# Altium footprint library Vibration_Datalogger.PcbLib: 76 footprints (part 4 of 5)
Each footprint in its own frame and in the unit in brackets; x right, y up, seen from the top. Pads: shape width x height; smd on the part's side, far side on the other; paste and mask are expansions set on the pad; w line width, h text height; cw(c..) or ccw(c..) is an arc to the next point about the centre after c.
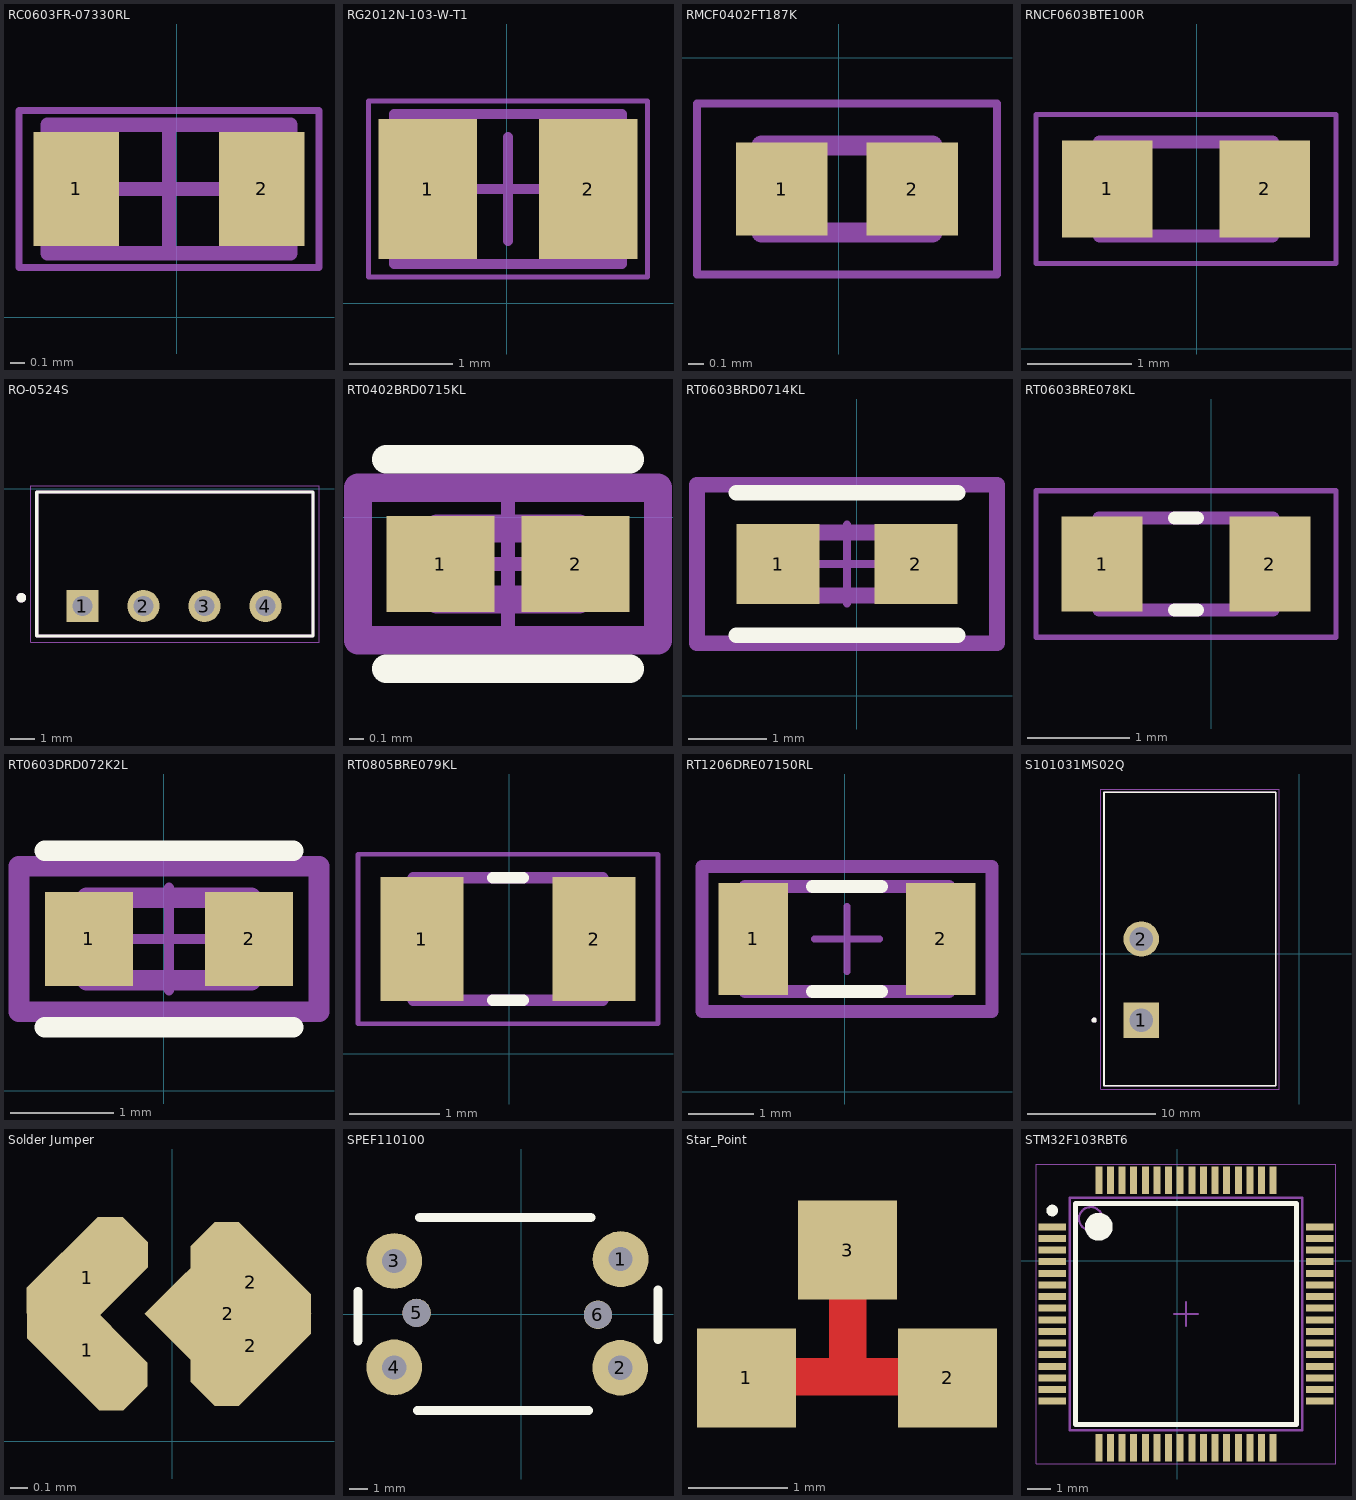
[diagram p3: the footprints below, top view; thin cyan lines are the x and y axes]

## RC0603FR-07330RL [mm] "RES 330 OHM 1% 1/10W 0603"
pads (2):
  rect 0.6x0.8 smd: 1(-0.705,0.897) 2(0.595,0.897)
Mechanical 13:
  lines w0.1: -0.905,0.447 -0.905,1.347 0.795,1.347 0.795,0.447 -0.905,0.447
Mechanical 15:
  lines w0.05: -1.105,0.347 -1.105,1.447 0.995,1.447 0.995,0.347 -1.105,0.347
  lines w0.1: -0.505,0.897 0.395,0.897 ; -0.055,0.447 -0.055,1.347
3D body: height 0.55, standoff 0, extent -0.655,0.447 0.545,1.347
3D body: height 0.55, standoff 0, extent -0.905,0.447 -0.655,1.347
3D body: height 0.55, standoff 0, extent 0.545,0.447 0.795,1.347

## RG2012N-103-W-T1 [mm] "RES SMD 10K OHM 0.05% 1/8W 0805"
pads (2):
  rect 0.95x1.35 smd: 1(-0.761,1.106) 2(0.789,1.106)
Mechanical 13:
  lines w0.1: -1.086,0.381 -1.086,1.831 1.114,1.831 1.114,0.381 -1.086,0.381
Mechanical 15:
  lines w0.05: -1.336,0.256 -1.336,1.956 1.364,1.956 1.364,0.256 -1.336,0.256
  lines w0.1: -0.486,1.106 0.514,1.106 ; 0.014,0.606 0.014,1.606
3D body: height 0.5, standoff 0, extent -0.686,0.381 0.714,1.831
3D body: height 0.5, standoff 0, extent -1.086,0.381 -0.686,1.831
3D body: height 0.5, standoff 0, extent 0.714,0.381 1.114,1.831

## RMCF0402FT187K [mm] "RES 187K OHM 1% 1/16W 0402"
pads (2):
  rect 0.59x0.6 smd paste+0 mask+0.102: 1(-0.368,-0.845) 2(0.472,-0.845)
Mechanical 13:
  lines w0.127: -0.498,-1.125 -0.498,-0.565 0.602,-0.565 0.602,-1.125 -0.498,-1.125
Mechanical 15:
  lines w0.05: -0.913,-1.395 -0.913,-0.295 1.017,-0.295 1.017,-1.395 -0.913,-1.395
3D body "step_temp.STEP": height 0.4, standoff 0, extent -0.448,-1.095 0.552,-0.595

## RNCF0603BTE100R [mm] "100 Ohms ±0.1% 0.167W, 1/6W Chip"
pads (2):
  rect 0.87x0.93 smd paste+0 mask+0.102: 1(-0.857,1.536) 2(0.653,1.536)
Mechanical 13:
  lines w0.127: -0.932,1.086 0.728,1.086 0.728,1.986 -0.932,1.986 -0.932,1.086
Mechanical 15:
  lines w0.05: -1.542,0.821 1.338,0.821 1.338,2.251 -1.542,2.251 -1.542,0.821
3D body "step_temp.STEP": height 0.55, standoff 0, extent -0.877,1.136 0.673,1.936

## RO-0524S [mm] "Recom 1W Iso DC-DC Converter"
pads (4):
  rect 1.338x1.338 hole 0.83: 1(4.141,-4.885)
  round 1.338 hole 0.83: 2(6.681,-4.885) 3(9.221,-4.885) 4(11.761,-4.885)
Top Overlay:
  circle w0.2: c1.601,-4.54 r0.1
  lines w0.127: 2.241,-6.135 13.741,-6.135 13.741,-0.135 2.241,-0.135 2.241,-6.135
Mechanical 13:
  circle w0.2: c1.601,-4.54 r0.1
  lines w0.127: 2.241,-6.135 13.741,-6.135 13.741,-0.135 2.241,-0.135 2.241,-6.135
Mechanical 15:
  lines w0.05: 1.991,-6.385 13.991,-6.385 13.991,0.115 1.991,0.115 1.991,-6.385
3D body "RO-0524S--3DModel-STEP-1.STEP": height 10.72, standoff -3.38, extent 2.241,-6.262 13.741,-0.262

## RT0402BRD0715KL [mm] "RES SMD 15K OHM 0.1% 1/16W 0402"
pads (2):
  rect 0.76x0.672 smd paste+0 mask+0: 1(-2.871,-0.329) 2(-1.919,-0.329)
Top Overlay:
  lines w0.2: -3.251,-1.065 -1.539,-1.065 ; -3.251,0.407 -1.539,0.407
Mechanical 5:
  lines w0.2: -3.451,-0.865 -1.339,-0.865 -1.339,0.207 -3.451,0.207 -3.451,-0.865
  text ".Designator" at -4.427,0.875 h1
Mechanical 13:
  lines w0.2: -2.895,-0.579 -1.895,-0.579 -1.895,-0.079 -2.895,-0.079 -2.895,-0.579
Mechanical 15:
  lines w0.2: -3.451,-0.865 -1.339,-0.865 -1.339,0.207 -3.451,0.207 -3.451,-0.865
Mechanical 16:
  lines w0.1: -2.895,-0.329 -1.895,-0.329 ; -2.395,-0.829 -2.395,0.171
3D body "Res_Yageo_RT0402BRE07118KL_eec.STEP": height 0.25, standoff 0, extent -3.451,-0.865 -1.339,0.207

## RT0603BRD0714KL [mm] "RES SMD 14K OHM 0.1% 1/10W 0603"
pads (2):
  rect 1.059x1.012 smd paste+0 mask+0: 1(-1.003,1.676) 2(0.751,1.676)
Top Overlay:
  lines w0.2: -1.532,0.77 1.28,0.77 ; -1.532,2.582 1.28,2.582
Mechanical 5:
  lines w0.2: -2.032,0.67 -2.032,2.682 1.78,2.682 1.78,0.67 -2.032,0.67
  text ".Designator" at -2.412,3.007 h1
Mechanical 13:
  lines w0.2: -0.926,1.276 -0.926,2.076 0.674,2.076 0.674,1.276 -0.926,1.276
Mechanical 15:
  lines w0.2: -2.032,0.67 -2.032,2.682 1.78,2.682 1.78,0.67 -2.032,0.67
Mechanical 16:
  lines w0.1: -0.626,1.676 0.374,1.676 ; -0.126,1.176 -0.126,2.176
3D body "Res_Yageo_RT0603CRE0724K3L_eec.STEP": height 0.25, standoff 0, extent -2.032,0.67 1.78,2.682

## RT0603BRE078KL [mm] "RES SMD 8K OHM 0.1% 1/10W 0603"
pads (2):
  rect 0.79x0.93 smd: 1(-1.066,2.706) 2(0.574,2.706)
Top Overlay:
  lines w0.127: -0.356,2.256 -0.136,2.256 ; -0.356,3.156 -0.136,3.156
Mechanical 13:
  lines w0.127: -1.096,2.256 -1.096,3.156 0.604,3.156 0.604,2.256 -1.096,2.256
Mechanical 15:
  lines w0.05: -1.711,1.991 -1.711,3.421 1.219,3.421 1.219,1.991 -1.711,1.991
3D body "step_temp.STEP": height 0.55, standoff 0, extent -1.046,2.306 0.554,3.106

## RT0603DRD072K2L [mm] "RES SMD 2.2K OHM 0.5% 1/10W 0603"
pads (2):
  rect 0.859x0.912 smd paste+0 mask+0: 1(-0.724,1.473) 2(0.83,1.473)
Top Overlay:
  lines w0.2: -1.153,0.617 1.259,0.617 ; -1.153,2.329 1.259,2.329
Mechanical 5:
  lines w0.2: -1.403,0.767 1.509,0.767 1.509,2.179 -1.403,2.179 -1.403,0.767
  text ".Designator" at -2.106,2.804 h1
Mechanical 13:
  lines w0.2: -0.747,1.073 0.853,1.073 0.853,1.873 -0.747,1.873 -0.747,1.073
Mechanical 15:
  lines w0.2: -1.403,0.767 1.509,0.767 1.509,2.179 -1.403,2.179 -1.403,0.767
Mechanical 16:
  lines w0.1: -0.447,1.473 0.553,1.473 ; 0.053,0.973 0.053,1.973
3D body "Res_Yageo_RT0603CRE0724K3L_eec.STEP": height 0.25, standoff 0, extent -1.403,0.767 1.509,2.179

## RT0805BRE079KL [mm] "RES SMD 9K OHM 0.1% 1/8W 0805"
pads (2):
  rect 0.92x1.38 smd paste+0 mask+0.102: 1(-0.971,1.272) 2(0.939,1.272)
Top Overlay:
  lines w0.127: -0.186,0.592 0.154,0.592 ; -0.186,1.952 0.154,1.952
Mechanical 13:
  lines w0.127: -1.066,0.592 -1.066,1.952 1.034,1.952 1.034,0.592 -1.066,0.592
Mechanical 15:
  lines w0.05: -1.681,0.332 -1.681,2.212 1.649,2.212 1.649,0.332 -1.681,0.332
3D body "step_temp.STEP": height 0.6, standoff 0, extent -1.016,0.647 0.984,1.897

## RT1206DRE07150RL [mm] "RES SMD 150 OHM 0.5% 1/4W 1206"
pads (2):
  rect 1.058x1.712 smd paste+0 mask+0: 1(-1.395,2.323) 2(1.459,2.323)
Top Overlay:
  lines w0.2: -0.491,1.523 0.555,1.523 ; -0.491,3.123 0.555,3.123
Mechanical 5:
  lines w0.2: -2.174,1.217 2.238,1.217 2.238,3.429 -2.174,3.429 -2.174,1.217
  text ".Designator" at -2.32,3.948 h1
Mechanical 13:
  lines w0.2: -1.518,1.523 1.582,1.523 1.582,3.123 -1.518,3.123 -1.518,1.523
Mechanical 15:
  lines w0.2: -2.174,1.217 2.238,1.217 2.238,3.429 -2.174,3.429 -2.174,1.217
Mechanical 16:
  lines w0.1: -0.468,2.323 0.532,2.323 ; 0.032,1.823 0.032,2.823
3D body "Res_Yageo_RT1206WRB073K92L_eec.STEP": height 0.25, standoff 0, extent -2.174,1.217 2.238,3.429

## S101031MS02Q [mm] "Commutateurs à glissière SPST 6A PC TH AG"
pads (2):
  rect 2.775x2.775 / inner round 2.775 / far side rect 2.775x2.775 hole 1.85: 1(-12.387,-5.18)
  round 2.775 hole 1.85: 2(-12.387,1.17)
Top Overlay:
  circle w0.2: c-16.077,-5.18 r0.1
  lines w0.127: -15.307,-10.325 -1.847,-10.325 -1.847,12.665 -15.307,12.665 -15.307,-10.325
Mechanical 13:
  circle w0.2: c-16.077,-5.18 r0.1
  lines w0.127: -15.307,-10.325 -1.847,-10.325 -1.847,12.665 -15.307,12.665 -15.307,-10.325
Mechanical 15:
  lines w0.05: -15.557,-10.575 -15.557,12.915 -1.597,12.915 -1.597,-10.575 -15.557,-10.575
3D body "step_temp.STEP": height 18.41, standoff -3.56, extent -15.308,-10.323 -1.846,12.664

## Solder Jumper [mil]
pads (5):
  oct 15x30 smd rot 45: 1(-18.76,19.98) 2(17.24,34.98)
  oct 15.75x30 smd rot 135: 1(-18.76,35.98)
  rect 26x26 smd rot 45: 2(12.24,27.98)
  oct 15x30 smd rot 135: 2(17.24,20.98)

## SPEF110100 [mm] "1.5mm-travel Vertical Type SPEF Series"
pads (6):
  round 3 hole 1.3: 1(5.34,2.97) 2(5.32,-2.87) 3(-6.83,2.87) 4(-6.83,-2.85)
  round 1.524 hole 1.5: 5(-5.63,0.08) 6(4.12,-0.02)
Top Overlay:
  lines w0.5: -8.78,-1.42 -8.78,1.23 ; -5.58,-5.17 3.61,-5.17 ; -5.46,5.21 3.73,5.21 ; 7.35,-1.34 7.35,1.31
3D body "SPEF110100.STEP": height 15.65, standoff -2.45, extent -7.024,-4.45 5.524,4.55

## Star_Point [mm]
pads (3):
  rect 1x1 smd: 1(-20.783,151.16)
  rect 1x1 smd mask+0.102: 2(-18.751,151.16) 3(-19.761,152.45)
Top Layer:
  region: -19.569,151.07 -19.569,152.467 -19.95,152.467 -19.95,151.07
  rectangle: -20.51,150.979 -19.113,151.36

## STM32F103RBT6 [mm] "IC MCU 32BIT 128KB FLASH 64LQFP"
pads (64):
  rect 1.2x0.3 smd: 1(-5.369,1.464) 2(-5.369,0.964) 3(-5.369,0.464) 4(-5.369,-0.036) 5(-5.369,-0.536) 6(-5.369,-1.036) 7(-5.369,-1.536) 8(-5.369,-2.036) 9(-5.369,-2.536) 10(-5.369,-3.036) 11(-5.369,-3.536) 12(-5.369,-4.036) 13(-5.369,-4.536) 14(-5.369,-5.036) 15(-5.369,-5.536) 16(-5.369,-6.036) 33(6.131,-6.036) 34(6.131,-5.536) 35(6.131,-5.036) 36(6.131,-4.536) 37(6.131,-4.036) 38(6.131,-3.536) 39(6.131,-3.036) 40(6.131,-2.536) 41(6.131,-2.036) 42(6.131,-1.536) 43(6.131,-1.036) 44(6.131,-0.536) 45(6.131,-0.036) 46(6.131,0.464) 47(6.131,0.964) 48(6.131,1.464)
  rect 0.3x1.2 smd: 17(-3.369,-8.036) 18(-2.869,-8.036) 19(-2.369,-8.036) 20(-1.869,-8.036) 21(-1.369,-8.036) 22(-0.869,-8.036) 23(-0.369,-8.036) 24(0.131,-8.036) 25(0.631,-8.036) 26(1.131,-8.036) 27(1.631,-8.036) 28(2.131,-8.036) 29(2.631,-8.036) 30(3.131,-8.036) 31(3.631,-8.036) 32(4.131,-8.036) 49(4.131,3.464) 50(3.631,3.464) 51(3.131,3.464) 52(2.631,3.464) 53(2.131,3.464) 54(1.631,3.464) 55(1.131,3.464) 56(0.631,3.464) 57(0.131,3.464) 58(-0.369,3.464) 59(-0.869,3.464) 60(-1.369,3.464) 61(-1.869,3.464) 62(-2.369,3.464) 63(-2.869,3.464) 64(-3.369,3.464)
Top Overlay:
  circle w0.6: c-3.369,1.464 r0.3
  circle w0.25: c-5.369,2.164 r0.125
  lines w0.2: -4.369,-7.036 5.131,-7.036 5.131,2.464 -4.369,2.464 -4.369,-7.036
Mechanical 13:
  circle w0.1: c-3.719,1.814 r0.5
  lines w0.1: -4.619,-7.286 5.381,-7.286 5.381,2.714 -4.619,2.714 -4.619,-7.286
Mechanical 15:
  lines w0.05: -6.069,-8.736 6.831,-8.736 6.831,4.164 -6.069,4.164 -6.069,-8.736
  lines w0.1: -0.119,-2.286 0.881,-2.286 ; 0.381,-2.786 0.381,-1.786
3D body "TSQFP50P1200X1200X160-64L.step": height 1.6, standoff 0, extent -5.619,-8.286 6.381,3.714